# Altium footprint library Package_DFN_QFN.PcbLib: 735 footprints (part 17 of 46)
Each footprint in its own frame and in the unit in brackets; x right, y up, seen from the top. Pads: shape width x height; smd on the part's side, far side on the other; paste and mask are expansions set on the pad; w line width, h text height; cw(c..) or ccw(c..) is an arc to the next point about the centre after c.
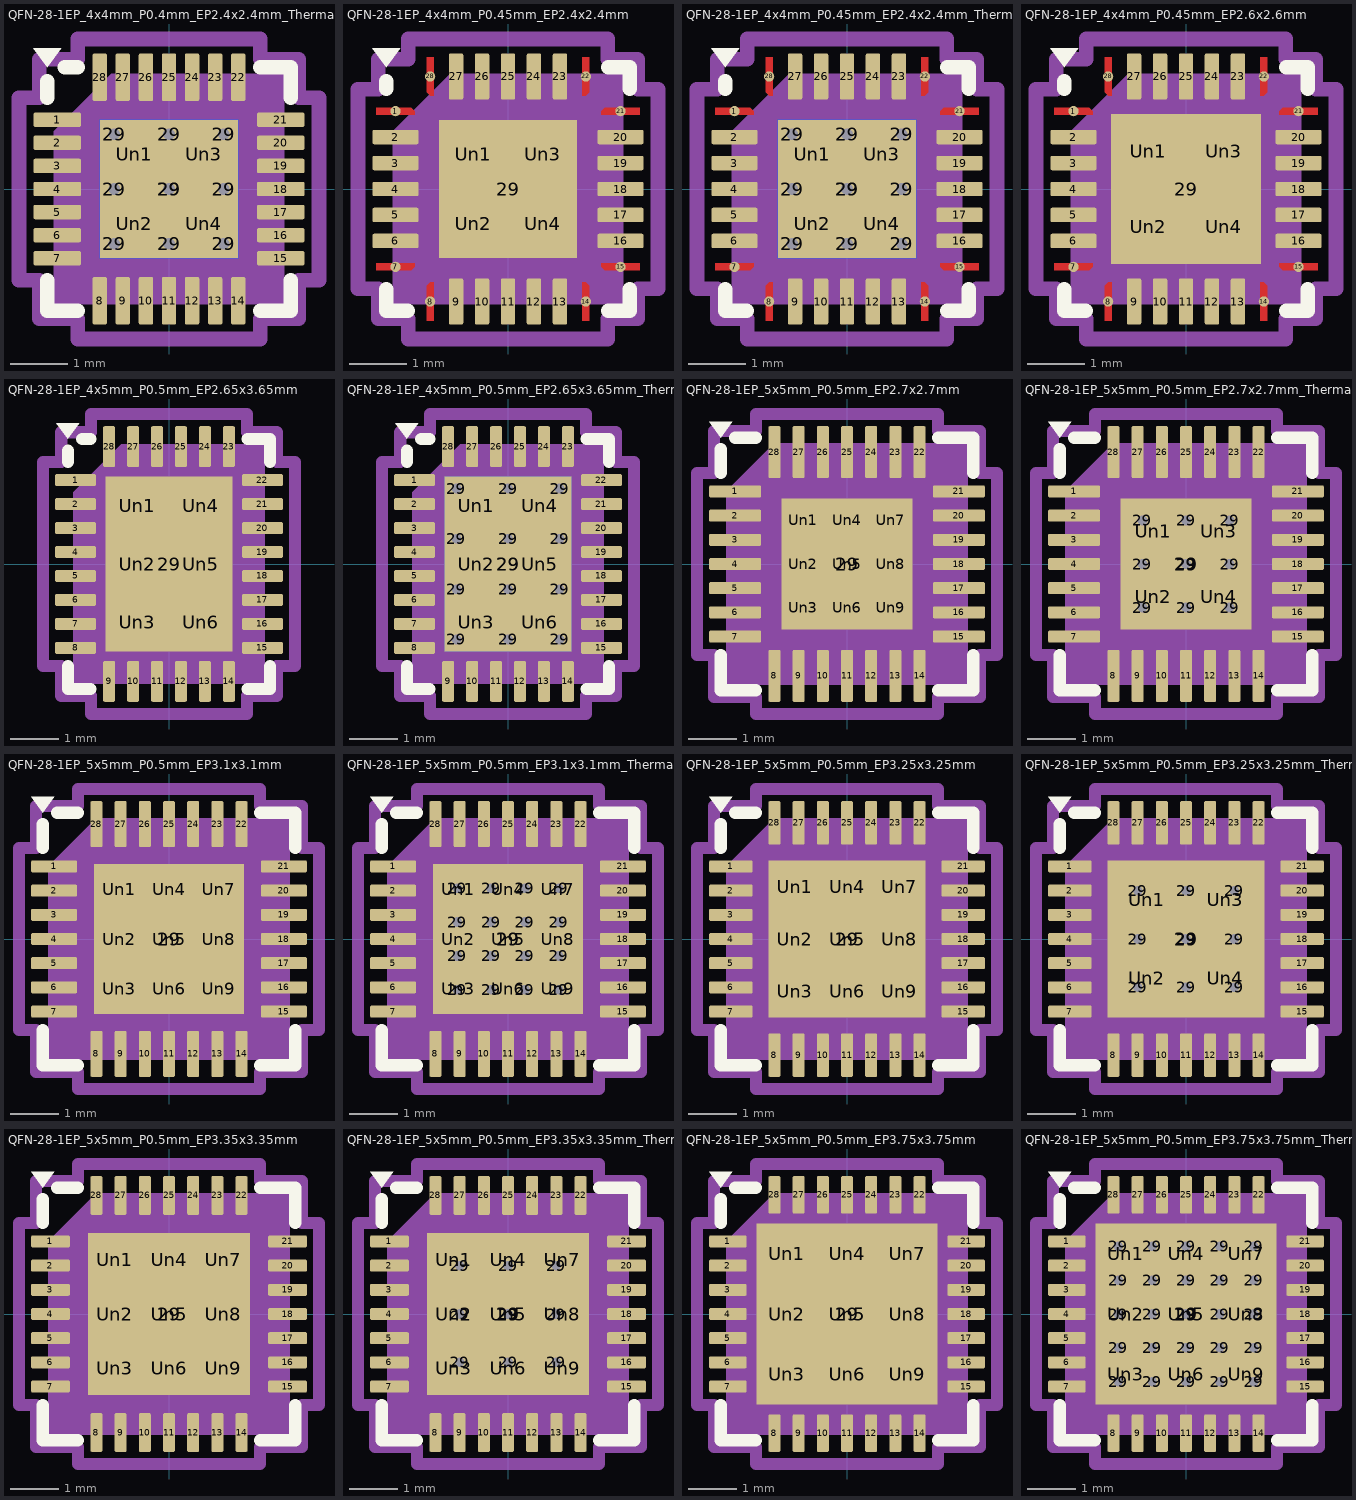
[diagram p16: the footprints below, top view; thin cyan lines are the x and y axes]

## QFN-28-1EP_4x4mm_P0.4mm_EP2.4x2.4mm_ThermalVias [mm] "QFN-28-1EP_4x4mm_P0.4mm_EP2.4x2.4mm_ThermalVias"
pads (43):
  rrect25% 0.825x0.25 smd: 1(-1.937,1.2) 2(-1.937,0.8) 3(-1.937,0.4) 4(-1.937,0) 5(-1.937,-0.4) 6(-1.937,-0.8) 7(-1.937,-1.2) 15(1.937,-1.2) 16(1.937,-0.8) 17(1.937,-0.4) 18(1.937,0) 19(1.937,0.4) 20(1.937,0.8) 21(1.937,1.2)
  rrect25% 0.25x0.825 smd: 8(-1.2,-1.937) 9(-0.8,-1.937) 10(-0.4,-1.937) 11(0,-1.937) 12(0.4,-1.937) 13(0.8,-1.937) 14(1.2,-1.937) 22(1.2,1.937) 23(0.8,1.937) 24(0.4,1.937) 25(0,1.937) 26(-0.4,1.937) 27(-0.8,1.937) 28(-1.2,1.937)
  round 0.5 hole 0.2: 29(-0.95,-0.95) 29(-0.95,0) 29(-0.95,0.95) 29(0,-0.95) 29(0,0) 29(0,0.95) 29(0.95,-0.95) 29(0.95,0) 29(0.95,0.95)
  rect 2.4x2.4 smd: 29(0,0)
  rect 2.4x2.4 smd far side: 29(0,0)
  rrect24% 1.04x1.04 on Top Paste: Un1(-0.6,0.6) Un2(-0.6,-0.6) Un3(0.6,0.6) Un4(0.6,-0.6)
F.SilkS:
  region: -2.11,2.11 -2.35,2.44 -1.87,2.44
  lines w0.254: -2.11,-1.585 -2.11,-2.11 -1.585,-2.11 ; -2.11,1.585 -2.11,1.87 ; -1.81,2.11 -1.585,2.11 ; 1.585,-2.11 2.11,-2.11 2.11,-1.585 ; 1.585,2.11 2.11,2.11 2.11,1.585
Top Component Center:
  lines w0.127: -0.127,0 0.127,0 -0.127,0 ; 0,-0.127 0,0.127 0,-0.127
Top Assembly:
  region: 2,-2 -2,-2 -2,1 -1,2 2,2
Top Courtyard:
  lines w0.254: -2.6,-1.58 -2.6,1.58 -2.25,1.58 -2.25,2.25 -1.58,2.25 -1.58,2.6 1.58,2.6 1.58,2.25 2.25,2.25 2.25,1.58 2.6,1.58 2.6,-1.58 2.25,-1.58 2.25,-2.25 1.58,-2.25 1.58,-2.6 -1.58,-2.6 -1.58,-2.25 -2.25,-2.25 -2.25,-1.58 -2.6,-1.58
Top Designator:
  text ".Designator" at -3.43,-0.344 h1.52
3D body "QFN-28-1EP_4x4mm_P0.4mm_EP2.4x2.4mm.step": height 0.77, standoff 0, extent -2,-2 2,2

## QFN-28-1EP_4x4mm_P0.45mm_EP2.4x2.4mm [mm] "QFN-28-1EP_4x4mm_P0.45mm_EP2.4x2.4mm"
pads (33):
  round 0.179 smd: 1(-1.95,1.35) 7(-1.95,-1.35) 8(-1.35,-1.95) 14(1.35,-1.95) 15(1.95,-1.35) 21(1.95,1.35) 22(1.35,1.95) 28(-1.35,1.95)
  rrect25% 0.8x0.25 smd: 2(-1.95,0.9) 3(-1.95,0.45) 4(-1.95,0) 5(-1.95,-0.45) 6(-1.95,-0.9) 16(1.95,-0.9) 17(1.95,-0.45) 18(1.95,0) 19(1.95,0.45) 20(1.95,0.9)
  rrect25% 0.25x0.8 smd: 9(-0.9,-1.95) 10(-0.45,-1.95) 11(0,-1.95) 12(0.45,-1.95) 13(0.9,-1.95) 23(0.9,1.95) 24(0.45,1.95) 25(0,1.95) 26(-0.45,1.95) 27(-0.9,1.95)
  rect 2.4x2.4 smd: 29(0,0)
  rrect25% 0.97x0.97 on Top Paste: Un1(-0.6,0.6) Un2(-0.6,-0.6) Un3(0.6,0.6) Un4(0.6,-0.6)
F.Cu:
  region: -1.613,1.349 -1.613,1.288 -2.288,1.288 -2.288,1.412 -1.676,1.412
  region: -1.613,-1.349 -1.676,-1.412 -2.288,-1.412 -2.288,-1.288 -1.613,-1.288
  region: -1.288,-2.288 -1.412,-2.288 -1.412,-1.676 -1.349,-1.613 -1.288,-1.613
  region: 1.412,-1.676 1.412,-2.288 1.288,-2.288 1.288,-1.613 1.349,-1.613
  region: 2.288,-1.412 1.676,-1.412 1.613,-1.349 1.613,-1.288 2.288,-1.288
  region: 2.288,1.288 1.613,1.288 1.613,1.349 1.676,1.412 2.288,1.412
  region: 1.412,1.676 1.349,1.613 1.288,1.613 1.288,2.288 1.412,2.288
  region: -1.288,1.613 -1.349,1.613 -1.412,1.676 -1.412,2.288 -1.288,2.288
F.SilkS:
  region: -2.11,2.11 -2.35,2.44 -1.87,2.44
  lines w0.254: -2.11,-1.735 -2.11,-2.11 -1.735,-2.11 ; -2.11,1.735 -2.11,1.87 ; 1.735,-2.11 2.11,-2.11 2.11,-1.735 ; 1.735,2.11 2.11,2.11 2.11,1.735
F.Paste:
  region: -1.613,1.349 -1.613,1.288 -2.288,1.288 -2.288,1.412 -1.676,1.412
  region: -1.613,-1.349 -1.676,-1.412 -2.288,-1.412 -2.288,-1.288 -1.613,-1.288
  region: -1.288,-2.288 -1.412,-2.288 -1.412,-1.676 -1.349,-1.613 -1.288,-1.613
  region: 1.412,-1.676 1.412,-2.288 1.288,-2.288 1.288,-1.613 1.349,-1.613
  region: 2.288,-1.412 1.676,-1.412 1.613,-1.349 1.613,-1.288 2.288,-1.288
  region: 2.288,1.288 1.613,1.288 1.613,1.349 1.676,1.412 2.288,1.412
  region: 1.412,1.676 1.349,1.613 1.288,1.613 1.288,2.288 1.412,2.288
  region: -1.288,1.613 -1.349,1.613 -1.412,1.676 -1.412,2.288 -1.288,2.288
F.Mask:
  region: -1.613,1.349 -1.613,1.288 -2.288,1.288 -2.288,1.412 -1.676,1.412
  region: -1.613,-1.349 -1.676,-1.412 -2.288,-1.412 -2.288,-1.288 -1.613,-1.288
  region: -1.288,-2.288 -1.412,-2.288 -1.412,-1.676 -1.349,-1.613 -1.288,-1.613
  region: 1.412,-1.676 1.412,-2.288 1.288,-2.288 1.288,-1.613 1.349,-1.613
  region: 2.288,-1.412 1.676,-1.412 1.613,-1.349 1.613,-1.288 2.288,-1.288
  region: 2.288,1.288 1.613,1.288 1.613,1.349 1.676,1.412 2.288,1.412
  region: 1.412,1.676 1.349,1.613 1.288,1.613 1.288,2.288 1.412,2.288
  region: -1.288,1.613 -1.349,1.613 -1.412,1.676 -1.412,2.288 -1.288,2.288
Top Component Center:
  lines w0.127: -0.127,0 0.127,0 -0.127,0 ; 0,-0.127 0,0.127 0,-0.127
Top Assembly:
  region: 2,-2 -2,-2 -2,1 -1,2 2,2
Top Courtyard:
  lines w0.254: -2.6,-1.73 -2.6,1.73 -2.25,1.73 -2.25,2.25 -1.73,2.25 -1.73,2.6 1.73,2.6 1.73,2.25 2.25,2.25 2.25,1.73 2.6,1.73 2.6,-1.73 2.25,-1.73 2.25,-2.25 1.73,-2.25 1.73,-2.6 -1.73,-2.6 -1.73,-2.25 -2.25,-2.25 -2.25,-1.73 -2.6,-1.73
Top Designator:
  text ".Designator" at -3.43,-0.344 h1.52

## QFN-28-1EP_4x4mm_P0.45mm_EP2.4x2.4mm_ThermalVias [mm] "QFN-28-1EP_4x4mm_P0.45mm_EP2.4x2.4mm_ThermalVias"
pads (43):
  round 0.179 smd: 1(-1.95,1.35) 7(-1.95,-1.35) 8(-1.35,-1.95) 14(1.35,-1.95) 15(1.95,-1.35) 21(1.95,1.35) 22(1.35,1.95) 28(-1.35,1.95)
  rrect25% 0.8x0.25 smd: 2(-1.95,0.9) 3(-1.95,0.45) 4(-1.95,0) 5(-1.95,-0.45) 6(-1.95,-0.9) 16(1.95,-0.9) 17(1.95,-0.45) 18(1.95,0) 19(1.95,0.45) 20(1.95,0.9)
  rrect25% 0.25x0.8 smd: 9(-0.9,-1.95) 10(-0.45,-1.95) 11(0,-1.95) 12(0.45,-1.95) 13(0.9,-1.95) 23(0.9,1.95) 24(0.45,1.95) 25(0,1.95) 26(-0.45,1.95) 27(-0.9,1.95)
  round 0.5 hole 0.2: 29(-0.95,-0.95) 29(-0.95,0) 29(-0.95,0.95) 29(0,-0.95) 29(0,0) 29(0,0.95) 29(0.95,-0.95) 29(0.95,0) 29(0.95,0.95)
  rect 2.4x2.4 smd: 29(0,0)
  rect 2.4x2.4 smd far side: 29(0,0)
  rrect24% 1.04x1.04 on Top Paste: Un1(-0.6,0.6) Un2(-0.6,-0.6) Un3(0.6,0.6) Un4(0.6,-0.6)
F.Cu:
  region: -1.613,1.349 -1.613,1.288 -2.288,1.288 -2.288,1.412 -1.676,1.412
  region: -1.613,-1.349 -1.676,-1.412 -2.288,-1.412 -2.288,-1.288 -1.613,-1.288
  region: -1.288,-2.288 -1.412,-2.288 -1.412,-1.676 -1.349,-1.613 -1.288,-1.613
  region: 1.412,-1.676 1.412,-2.288 1.288,-2.288 1.288,-1.613 1.349,-1.613
  region: 2.288,-1.412 1.676,-1.412 1.613,-1.349 1.613,-1.288 2.288,-1.288
  region: 2.288,1.288 1.613,1.288 1.613,1.349 1.676,1.412 2.288,1.412
  region: 1.412,1.676 1.349,1.613 1.288,1.613 1.288,2.288 1.412,2.288
  region: -1.288,1.613 -1.349,1.613 -1.412,1.676 -1.412,2.288 -1.288,2.288
F.SilkS:
  region: -2.11,2.11 -2.35,2.44 -1.87,2.44
  lines w0.254: -2.11,-1.735 -2.11,-2.11 -1.735,-2.11 ; -2.11,1.735 -2.11,1.87 ; 1.735,-2.11 2.11,-2.11 2.11,-1.735 ; 1.735,2.11 2.11,2.11 2.11,1.735
F.Paste:
  region: -1.613,1.349 -1.613,1.288 -2.288,1.288 -2.288,1.412 -1.676,1.412
  region: -1.613,-1.349 -1.676,-1.412 -2.288,-1.412 -2.288,-1.288 -1.613,-1.288
  region: -1.288,-2.288 -1.412,-2.288 -1.412,-1.676 -1.349,-1.613 -1.288,-1.613
  region: 1.412,-1.676 1.412,-2.288 1.288,-2.288 1.288,-1.613 1.349,-1.613
  region: 2.288,-1.412 1.676,-1.412 1.613,-1.349 1.613,-1.288 2.288,-1.288
  region: 2.288,1.288 1.613,1.288 1.613,1.349 1.676,1.412 2.288,1.412
  region: 1.412,1.676 1.349,1.613 1.288,1.613 1.288,2.288 1.412,2.288
  region: -1.288,1.613 -1.349,1.613 -1.412,1.676 -1.412,2.288 -1.288,2.288
F.Mask:
  region: -1.613,1.349 -1.613,1.288 -2.288,1.288 -2.288,1.412 -1.676,1.412
  region: -1.613,-1.349 -1.676,-1.412 -2.288,-1.412 -2.288,-1.288 -1.613,-1.288
  region: -1.288,-2.288 -1.412,-2.288 -1.412,-1.676 -1.349,-1.613 -1.288,-1.613
  region: 1.412,-1.676 1.412,-2.288 1.288,-2.288 1.288,-1.613 1.349,-1.613
  region: 2.288,-1.412 1.676,-1.412 1.613,-1.349 1.613,-1.288 2.288,-1.288
  region: 2.288,1.288 1.613,1.288 1.613,1.349 1.676,1.412 2.288,1.412
  region: 1.412,1.676 1.349,1.613 1.288,1.613 1.288,2.288 1.412,2.288
  region: -1.288,1.613 -1.349,1.613 -1.412,1.676 -1.412,2.288 -1.288,2.288
Top Component Center:
  lines w0.127: -0.127,0 0.127,0 -0.127,0 ; 0,-0.127 0,0.127 0,-0.127
Top Assembly:
  region: 2,-2 -2,-2 -2,1 -1,2 2,2
Top Courtyard:
  lines w0.254: -2.6,-1.73 -2.6,1.73 -2.25,1.73 -2.25,2.25 -1.73,2.25 -1.73,2.6 1.73,2.6 1.73,2.25 2.25,2.25 2.25,1.73 2.6,1.73 2.6,-1.73 2.25,-1.73 2.25,-2.25 1.73,-2.25 1.73,-2.6 -1.73,-2.6 -1.73,-2.25 -2.25,-2.25 -2.25,-1.73 -2.6,-1.73
Top Designator:
  text ".Designator" at -3.43,-0.344 h1.52

## QFN-28-1EP_4x4mm_P0.45mm_EP2.6x2.6mm [mm] "QFN-28-1EP_4x4mm_P0.45mm_EP2.6x2.6mm"
pads (33):
  round 0.179 smd: 1(-1.95,1.35) 7(-1.95,-1.35) 8(-1.35,-1.95) 14(1.35,-1.95) 15(1.95,-1.35) 21(1.95,1.35) 22(1.35,1.95) 28(-1.35,1.95)
  rrect25% 0.8x0.25 smd: 2(-1.95,0.9) 3(-1.95,0.45) 4(-1.95,0) 5(-1.95,-0.45) 6(-1.95,-0.9) 16(1.95,-0.9) 17(1.95,-0.45) 18(1.95,0) 19(1.95,0.45) 20(1.95,0.9)
  rrect25% 0.25x0.8 smd: 9(-0.9,-1.95) 10(-0.45,-1.95) 11(0,-1.95) 12(0.45,-1.95) 13(0.9,-1.95) 23(0.9,1.95) 24(0.45,1.95) 25(0,1.95) 26(-0.45,1.95) 27(-0.9,1.95)
  rect 2.6x2.6 smd: 29(0,0)
  rrect24% 1.05x1.05 on Top Paste: Un1(-0.65,0.65) Un2(-0.65,-0.65) Un3(0.65,0.65) Un4(0.65,-0.65)
F.Cu:
  region: -1.288,1.613 -1.349,1.613 -1.412,1.676 -1.412,2.288 -1.288,2.288
  region: 1.412,1.676 1.349,1.613 1.288,1.613 1.288,2.288 1.412,2.288
  region: 2.288,1.288 1.613,1.288 1.613,1.349 1.676,1.412 2.288,1.412
  region: 2.288,-1.412 1.676,-1.412 1.613,-1.349 1.613,-1.288 2.288,-1.288
  region: 1.412,-1.676 1.412,-2.288 1.288,-2.288 1.288,-1.613 1.349,-1.613
  region: -1.288,-2.288 -1.412,-2.288 -1.412,-1.676 -1.349,-1.613 -1.288,-1.613
  region: -1.613,-1.349 -1.676,-1.412 -2.288,-1.412 -2.288,-1.288 -1.613,-1.288
  region: -1.613,1.349 -1.613,1.288 -2.288,1.288 -2.288,1.412 -1.676,1.412
F.SilkS:
  region: -2.11,2.11 -2.35,2.44 -1.87,2.44
  lines w0.254: -2.11,-1.735 -2.11,-2.11 -1.735,-2.11 ; -2.11,1.735 -2.11,1.87 ; 1.735,-2.11 2.11,-2.11 2.11,-1.735 ; 1.735,2.11 2.11,2.11 2.11,1.735
F.Paste:
  region: -1.288,1.613 -1.349,1.613 -1.412,1.676 -1.412,2.288 -1.288,2.288
  region: 1.412,1.676 1.349,1.613 1.288,1.613 1.288,2.288 1.412,2.288
  region: 2.288,1.288 1.613,1.288 1.613,1.349 1.676,1.412 2.288,1.412
  region: 2.288,-1.412 1.676,-1.412 1.613,-1.349 1.613,-1.288 2.288,-1.288
  region: 1.412,-1.676 1.412,-2.288 1.288,-2.288 1.288,-1.613 1.349,-1.613
  region: -1.288,-2.288 -1.412,-2.288 -1.412,-1.676 -1.349,-1.613 -1.288,-1.613
  region: -1.613,-1.349 -1.676,-1.412 -2.288,-1.412 -2.288,-1.288 -1.613,-1.288
  region: -1.613,1.349 -1.613,1.288 -2.288,1.288 -2.288,1.412 -1.676,1.412
F.Mask:
  region: -1.288,1.613 -1.349,1.613 -1.412,1.676 -1.412,2.288 -1.288,2.288
  region: 1.412,1.676 1.349,1.613 1.288,1.613 1.288,2.288 1.412,2.288
  region: 2.288,1.288 1.613,1.288 1.613,1.349 1.676,1.412 2.288,1.412
  region: 2.288,-1.412 1.676,-1.412 1.613,-1.349 1.613,-1.288 2.288,-1.288
  region: 1.412,-1.676 1.412,-2.288 1.288,-2.288 1.288,-1.613 1.349,-1.613
  region: -1.288,-2.288 -1.412,-2.288 -1.412,-1.676 -1.349,-1.613 -1.288,-1.613
  region: -1.613,-1.349 -1.676,-1.412 -2.288,-1.412 -2.288,-1.288 -1.613,-1.288
  region: -1.613,1.349 -1.613,1.288 -2.288,1.288 -2.288,1.412 -1.676,1.412
Top Component Center:
  lines w0.127: -0.127,0 0.127,0 -0.127,0 ; 0,-0.127 0,0.127 0,-0.127
Top Assembly:
  region: 2,-2 -2,-2 -2,1 -1,2 2,2
Top Courtyard:
  lines w0.254: -2.6,-1.73 -2.25,-1.73 -2.25,-2.25 -1.73,-2.25 -1.73,-2.6 1.73,-2.6 1.73,-2.25 2.25,-2.25 2.25,-1.73 2.6,-1.73 2.6,1.73 2.25,1.73 2.25,2.25 1.73,2.25 1.73,2.6 -1.73,2.6 -1.73,2.25 -2.25,2.25 -2.25,1.73 -2.6,1.73 -2.6,-1.73
Top Designator:
  text ".Designator" at -3.43,-0.344 h1.52

## QFN-28-1EP_4x5mm_P0.5mm_EP2.65x3.65mm [mm] "QFN-28-1EP_4x5mm_P0.5mm_EP2.65x3.65mm"
pads (35):
  rrect25% 0.85x0.25 smd: 1(-1.95,1.75) 2(-1.95,1.25) 3(-1.95,0.75) 4(-1.95,0.25) 5(-1.95,-0.25) 6(-1.95,-0.75) 7(-1.95,-1.25) 8(-1.95,-1.75) 15(1.95,-1.75) 16(1.95,-1.25) 17(1.95,-0.75) 18(1.95,-0.25) 19(1.95,0.25) 20(1.95,0.75) 21(1.95,1.25) 22(1.95,1.75)
  rrect25% 0.25x0.85 smd: 9(-1.25,-2.45) 10(-0.75,-2.45) 11(-0.25,-2.45) 12(0.25,-2.45) 13(0.75,-2.45) 14(1.25,-2.45) 23(1.25,2.45) 24(0.75,2.45) 25(0.25,2.45) 26(-0.25,2.45) 27(-0.75,2.45) 28(-1.25,2.45)
  rect 2.65x3.65 smd: 29(0,0)
  rrect25% 1.07x0.98 on Top Paste: Un1(-0.66,1.22) Un2(-0.66,0) Un3(-0.66,-1.22) Un4(0.66,1.22) Un5(0.66,0) Un6(0.66,-1.22)
F.SilkS:
  region: -2.11,2.61 -2.35,2.94 -1.87,2.94
  lines w0.254: -2.11,-2.135 -2.11,-2.61 -1.635,-2.61 ; -2.11,2.135 -2.11,2.37 ; -1.81,2.61 -1.635,2.61 ; 1.635,-2.61 2.11,-2.61 2.11,-2.135 ; 1.635,2.61 2.11,2.61 2.11,2.135
Top Component Center:
  lines w0.127: -0.127,0 0.127,0 -0.127,0 ; 0,-0.127 0,0.127 0,-0.127
Top Assembly:
  region: 2,-2.5 -2,-2.5 -2,1.5 -1,2.5 2,2.5
Top Courtyard:
  lines w0.254: -2.63,-2.13 -2.63,2.13 -2.25,2.13 -2.25,2.75 -1.63,2.75 -1.63,3.13 1.63,3.13 1.63,2.75 2.25,2.75 2.25,2.13 2.63,2.13 2.63,-2.13 2.25,-2.13 2.25,-2.75 1.63,-2.75 1.63,-3.13 -1.63,-3.13 -1.63,-2.75 -2.25,-2.75 -2.25,-2.13 -2.63,-2.13
Top Designator:
  text ".Designator" at -3.43,-0.344 h1.52
3D body "QFN-28-1EP_4x5mm_P0.5mm_EP2.65x3.25mm.step": height 0.77, standoff 0, extent -2,-2.5 2,2.5

## QFN-28-1EP_4x5mm_P0.5mm_EP2.65x3.65mm_ThermalVias [mm] "QFN-28-1EP_4x5mm_P0.5mm_EP2.65x3.65mm_ThermalVias"
pads (48):
  rrect25% 0.85x0.25 smd: 1(-1.95,1.75) 2(-1.95,1.25) 3(-1.95,0.75) 4(-1.95,0.25) 5(-1.95,-0.25) 6(-1.95,-0.75) 7(-1.95,-1.25) 8(-1.95,-1.75) 15(1.95,-1.75) 16(1.95,-1.25) 17(1.95,-0.75) 18(1.95,-0.25) 19(1.95,0.25) 20(1.95,0.75) 21(1.95,1.25) 22(1.95,1.75)
  rrect25% 0.25x0.85 smd: 9(-1.25,-2.45) 10(-0.75,-2.45) 11(-0.25,-2.45) 12(0.25,-2.45) 13(0.75,-2.45) 14(1.25,-2.45) 23(1.25,2.45) 24(0.75,2.45) 25(0.25,2.45) 26(-0.25,2.45) 27(-0.75,2.45) 28(-1.25,2.45)
  round 0.5 hole 0.2: 29(-1.075,-1.575) 29(-1.075,-0.525) 29(-1.075,0.525) 29(-1.075,1.575) 29(0,-1.575) 29(0,-0.525) 29(0,0.525) 29(0,1.575) 29(1.075,-1.575) 29(1.075,-0.525) 29(1.075,0.525) 29(1.075,1.575)
  rect 2.65x3.65 smd: 29(0,0)
  rect 2.65x3.65 smd far side: 29(0,0)
  rrect25% 1.07x0.98 on Top Paste: Un1(-0.66,1.22) Un2(-0.66,0) Un3(-0.66,-1.22) Un4(0.66,1.22) Un5(0.66,0) Un6(0.66,-1.22)
F.SilkS:
  region: -2.11,2.61 -2.35,2.94 -1.87,2.94
  lines w0.254: -2.11,-2.135 -2.11,-2.61 -1.635,-2.61 ; -2.11,2.135 -2.11,2.37 ; -1.81,2.61 -1.635,2.61 ; 1.635,-2.61 2.11,-2.61 2.11,-2.135 ; 1.635,2.61 2.11,2.61 2.11,2.135
Top Component Center:
  lines w0.127: -0.127,0 0.127,0 -0.127,0 ; 0,-0.127 0,0.127 0,-0.127
Top Assembly:
  region: 2,-2.5 -2,-2.5 -2,1.5 -1,2.5 2,2.5
Top Courtyard:
  lines w0.254: -2.63,-2.13 -2.63,2.13 -2.25,2.13 -2.25,2.75 -1.63,2.75 -1.63,3.13 1.63,3.13 1.63,2.75 2.25,2.75 2.25,2.13 2.63,2.13 2.63,-2.13 2.25,-2.13 2.25,-2.75 1.63,-2.75 1.63,-3.13 -1.63,-3.13 -1.63,-2.75 -2.25,-2.75 -2.25,-2.13 -2.63,-2.13
Top Designator:
  text ".Designator" at -3.43,-0.344 h1.52
3D body "QFN-28-1EP_4x5mm_P0.5mm_EP2.65x3.25mm.step": height 0.77, standoff 0, extent -2,-2.5 2,2.5

## QFN-28-1EP_5x5mm_P0.5mm_EP2.7x2.7mm [mm] "QFN-28-1EP_5x5mm_P0.5mm_EP2.7x2.7mm"
pads (38):
  rrect25% 1.075x0.25 smd: 1(-2.312,1.5) 2(-2.312,1) 3(-2.312,0.5) 4(-2.312,0) 5(-2.312,-0.5) 6(-2.312,-1) 7(-2.312,-1.5) 15(2.312,-1.5) 16(2.312,-1) 17(2.312,-0.5) 18(2.312,0) 19(2.312,0.5) 20(2.312,1) 21(2.312,1.5)
  rrect25% 0.25x1.075 smd: 8(-1.5,-2.312) 9(-1,-2.312) 10(-0.5,-2.312) 11(0,-2.312) 12(0.5,-2.312) 13(1,-2.312) 14(1.5,-2.312) 22(1.5,2.312) 23(1,2.312) 24(0.5,2.312) 25(0,2.312) 26(-0.5,2.312) 27(-1,2.312) 28(-1.5,2.312)
  rect 2.7x2.7 smd: 29(0,0)
  rrect25% 0.73x0.73 on Top Paste: Un1(-0.9,0.9) Un2(-0.9,0) Un3(-0.9,-0.9) Un4(0,0.9) Un5(0,0) Un6(0,-0.9) Un7(0.9,0.9) Un8(0.9,0) Un9(0.9,-0.9)
F.SilkS:
  region: -2.61,2.61 -2.85,2.94 -2.37,2.94
  lines w0.254: -2.61,-1.885 -2.61,-2.61 -1.885,-2.61 ; -2.61,1.885 -2.61,2.37 ; -2.31,2.61 -1.885,2.61 ; 1.885,-2.61 2.61,-2.61 2.61,-1.885 ; 1.885,2.61 2.61,2.61 2.61,1.885
Top Component Center:
  lines w0.127: -0.127,0 0.127,0 -0.127,0 ; 0,-0.127 0,0.127 0,-0.127
Top Assembly:
  region: 2.5,-2.5 -2.5,-2.5 -2.5,1.5 -1.5,2.5 2.5,2.5
Top Courtyard:
  lines w0.254: -3.1,-1.88 -2.75,-1.88 -2.75,-2.75 -1.88,-2.75 -1.88,-3.1 1.88,-3.1 1.88,-2.75 2.75,-2.75 2.75,-1.88 3.1,-1.88 3.1,1.88 2.75,1.88 2.75,2.75 1.88,2.75 1.88,3.1 -1.88,3.1 -1.88,2.75 -2.75,2.75 -2.75,1.88 -3.1,1.88 -3.1,-1.88
Top Designator:
  text ".Designator" at -3.43,-0.344 h1.52
3D body "QFN-28-1EP_5x5mm_P0.5mm_EP3.35x3.35mm.step": height 0.92, standoff 0, extent -2.5,-2.5 2.5,2.5

## QFN-28-1EP_5x5mm_P0.5mm_EP2.7x2.7mm_ThermalVias [mm] "QFN-28-1EP_5x5mm_P0.5mm_EP2.7x2.7mm_ThermalVias"
pads (43):
  rrect25% 1.075x0.25 smd: 1(-2.312,1.5) 2(-2.312,1) 3(-2.312,0.5) 4(-2.312,0) 5(-2.312,-0.5) 6(-2.312,-1) 7(-2.312,-1.5) 15(2.312,-1.5) 16(2.312,-1) 17(2.312,-0.5) 18(2.312,0) 19(2.312,0.5) 20(2.312,1) 21(2.312,1.5)
  rrect25% 0.25x1.075 smd: 8(-1.5,-2.312) 9(-1,-2.312) 10(-0.5,-2.312) 11(0,-2.312) 12(0.5,-2.312) 13(1,-2.312) 14(1.5,-2.312) 22(1.5,2.312) 23(1,2.312) 24(0.5,2.312) 25(0,2.312) 26(-0.5,2.312) 27(-1,2.312) 28(-1.5,2.312)
  round 0.5 hole 0.2: 29(-0.9,-0.9) 29(-0.9,0) 29(-0.9,0.9) 29(0,-0.9) 29(0,0) 29(0,0.9) 29(0.9,-0.9) 29(0.9,0) 29(0.9,0.9)
  rect 2.7x2.7 smd: 29(0,0)
  rect 2.3x2.3 smd far side: 29(0,0)
  rrect23% 1.09x1.09 on Top Paste: Un1(-0.675,0.675) Un2(-0.675,-0.675) Un3(0.675,0.675) Un4(0.675,-0.675)
F.SilkS:
  region: -2.61,2.61 -2.85,2.94 -2.37,2.94
  lines w0.254: -2.61,-1.885 -2.61,-2.61 -1.885,-2.61 ; -2.61,1.885 -2.61,2.37 ; -2.31,2.61 -1.885,2.61 ; 1.885,-2.61 2.61,-2.61 2.61,-1.885 ; 1.885,2.61 2.61,2.61 2.61,1.885
Top Component Center:
  lines w0.127: -0.127,0 0.127,0 -0.127,0 ; 0,-0.127 0,0.127 0,-0.127
Top Assembly:
  region: 2.5,-2.5 -2.5,-2.5 -2.5,1.5 -1.5,2.5 2.5,2.5
Top Courtyard:
  lines w0.254: -3.1,-1.88 -2.75,-1.88 -2.75,-2.75 -1.88,-2.75 -1.88,-3.1 1.88,-3.1 1.88,-2.75 2.75,-2.75 2.75,-1.88 3.1,-1.88 3.1,1.88 2.75,1.88 2.75,2.75 1.88,2.75 1.88,3.1 -1.88,3.1 -1.88,2.75 -2.75,2.75 -2.75,1.88 -3.1,1.88 -3.1,-1.88
Top Designator:
  text ".Designator" at -3.43,-0.344 h1.52
3D body "QFN-28-1EP_5x5mm_P0.5mm_EP3.35x3.35mm.step": height 0.92, standoff 0, extent -2.5,-2.5 2.5,2.5

## QFN-28-1EP_5x5mm_P0.5mm_EP3.1x3.1mm [mm] "QFN-28-1EP_5x5mm_P0.5mm_EP3.1x3.1mm"
pads (38):
  rrect25% 0.95x0.25 smd: 1(-2.375,1.5) 2(-2.375,1) 3(-2.375,0.5) 4(-2.375,0) 5(-2.375,-0.5) 6(-2.375,-1) 7(-2.375,-1.5) 15(2.375,-1.5) 16(2.375,-1) 17(2.375,-0.5) 18(2.375,0) 19(2.375,0.5) 20(2.375,1) 21(2.375,1.5)
  rrect25% 0.25x0.95 smd: 8(-1.5,-2.375) 9(-1,-2.375) 10(-0.5,-2.375) 11(0,-2.375) 12(0.5,-2.375) 13(1,-2.375) 14(1.5,-2.375) 22(1.5,2.375) 23(1,2.375) 24(0.5,2.375) 25(0,2.375) 26(-0.5,2.375) 27(-1,2.375) 28(-1.5,2.375)
  rect 3.1x3.1 smd: 29(0,0)
  rrect25% 0.83x0.83 on Top Paste: Un1(-1.03,1.03) Un2(-1.03,0) Un3(-1.03,-1.03) Un4(0,1.03) Un5(0,0) Un6(0,-1.03) Un7(1.03,1.03) Un8(1.03,0) Un9(1.03,-1.03)
F.SilkS:
  region: -2.61,2.61 -2.85,2.94 -2.37,2.94
  lines w0.254: -2.61,-1.885 -2.61,-2.61 -1.885,-2.61 ; -2.61,1.885 -2.61,2.37 ; -2.31,2.61 -1.885,2.61 ; 1.885,-2.61 2.61,-2.61 2.61,-1.885 ; 1.885,2.61 2.61,2.61 2.61,1.885
Top Component Center:
  lines w0.127: -0.127,0 0.127,0 -0.127,0 ; 0,-0.127 0,0.127 0,-0.127
Top Assembly:
  region: 2.5,-2.5 -2.5,-2.5 -2.5,1.5 -1.5,2.5 2.5,2.5
Top Courtyard:
  lines w0.254: -3.1,-1.88 -3.1,1.88 -2.75,1.88 -2.75,2.75 -1.88,2.75 -1.88,3.1 1.88,3.1 1.88,2.75 2.75,2.75 2.75,1.88 3.1,1.88 3.1,-1.88 2.75,-1.88 2.75,-2.75 1.88,-2.75 1.88,-3.1 -1.88,-3.1 -1.88,-2.75 -2.75,-2.75 -2.75,-1.88 -3.1,-1.88
Top Designator:
  text ".Designator" at -3.43,-0.344 h1.52
3D body "QFN-28-1EP_5x5mm_P0.5mm_EP3.35x3.35mm.step": height 0.92, standoff 0, extent -2.5,-2.5 2.5,2.5

## QFN-28-1EP_5x5mm_P0.5mm_EP3.1x3.1mm_ThermalVias [mm] "QFN-28-1EP_5x5mm_P0.5mm_EP3.1x3.1mm_ThermalVias"
pads (55):
  rrect25% 0.95x0.25 smd: 1(-2.375,1.5) 2(-2.375,1) 3(-2.375,0.5) 4(-2.375,0) 5(-2.375,-0.5) 6(-2.375,-1) 7(-2.375,-1.5) 15(2.375,-1.5) 16(2.375,-1) 17(2.375,-0.5) 18(2.375,0) 19(2.375,0.5) 20(2.375,1) 21(2.375,1.5)
  rrect25% 0.25x0.95 smd: 8(-1.5,-2.375) 9(-1,-2.375) 10(-0.5,-2.375) 11(0,-2.375) 12(0.5,-2.375) 13(1,-2.375) 14(1.5,-2.375) 22(1.5,2.375) 23(1,2.375) 24(0.5,2.375) 25(0,2.375) 26(-0.5,2.375) 27(-1,2.375) 28(-1.5,2.375)
  round 0.5 hole 0.2: 29(-1.05,-1.05) 29(-1.05,-0.35) 29(-1.05,0.35) 29(-1.05,1.05) 29(-0.35,-1.05) 29(-0.35,-0.35) 29(-0.35,0.35) 29(-0.35,1.05) 29(0.35,-1.05) 29(0.35,-0.35) 29(0.35,0.35) 29(0.35,1.05) 29(1.05,-1.05) 29(1.05,-0.35) 29(1.05,0.35) 29(1.05,1.05)
  rect 3.1x3.1 smd: 29(0,0)
  rect 2.6x2.6 smd far side: 29(0,0)
  rrect25% 0.83x0.83 on Top Paste: Un1(-1.03,1.03) Un2(-1.03,0) Un3(-1.03,-1.03) Un4(0,1.03) Un5(0,0) Un6(0,-1.03) Un7(1.03,1.03) Un8(1.03,0) Un9(1.03,-1.03)
F.SilkS:
  region: -2.61,2.61 -2.85,2.94 -2.37,2.94
  lines w0.254: -2.61,-1.885 -2.61,-2.61 -1.885,-2.61 ; -2.61,1.885 -2.61,2.37 ; -2.31,2.61 -1.885,2.61 ; 1.885,-2.61 2.61,-2.61 2.61,-1.885 ; 1.885,2.61 2.61,2.61 2.61,1.885
Top Component Center:
  lines w0.127: -0.127,0 0.127,0 -0.127,0 ; 0,-0.127 0,0.127 0,-0.127
Top Assembly:
  region: 2.5,-2.5 -2.5,-2.5 -2.5,1.5 -1.5,2.5 2.5,2.5
Top Courtyard:
  lines w0.254: -3.1,-1.88 -3.1,1.88 -2.75,1.88 -2.75,2.75 -1.88,2.75 -1.88,3.1 1.88,3.1 1.88,2.75 2.75,2.75 2.75,1.88 3.1,1.88 3.1,-1.88 2.75,-1.88 2.75,-2.75 1.88,-2.75 1.88,-3.1 -1.88,-3.1 -1.88,-2.75 -2.75,-2.75 -2.75,-1.88 -3.1,-1.88
Top Designator:
  text ".Designator" at -3.43,-0.344 h1.52
3D body "QFN-28-1EP_5x5mm_P0.5mm_EP3.35x3.35mm.step": height 0.92, standoff 0, extent -2.5,-2.5 2.5,2.5

## QFN-28-1EP_5x5mm_P0.5mm_EP3.25x3.25mm [mm] "QFN-28-1EP_5x5mm_P0.5mm_EP3.25x3.25mm"
pads (38):
  rrect25% 0.9x0.25 smd: 1(-2.4,1.5) 2(-2.4,1) 3(-2.4,0.5) 4(-2.4,0) 5(-2.4,-0.5) 6(-2.4,-1) 7(-2.4,-1.5) 15(2.4,-1.5) 16(2.4,-1) 17(2.4,-0.5) 18(2.4,0) 19(2.4,0.5) 20(2.4,1) 21(2.4,1.5)
  rrect25% 0.25x0.9 smd: 8(-1.5,-2.4) 9(-1,-2.4) 10(-0.5,-2.4) 11(0,-2.4) 12(0.5,-2.4) 13(1,-2.4) 14(1.5,-2.4) 22(1.5,2.4) 23(1,2.4) 24(0.5,2.4) 25(0,2.4) 26(-0.5,2.4) 27(-1,2.4) 28(-1.5,2.4)
  rect 3.25x3.25 smd: 29(0,0)
  rrect25% 0.89x0.89 on Top Paste: Un1(-1.08,1.08) Un2(-1.08,0) Un3(-1.08,-1.08) Un4(0,1.08) Un5(0,0) Un6(0,-1.08) Un7(1.08,1.08) Un8(1.08,0) Un9(1.08,-1.08)
F.SilkS:
  region: -2.61,2.61 -2.85,2.94 -2.37,2.94
  lines w0.254: -2.61,-1.885 -2.61,-2.61 -1.885,-2.61 ; -2.61,1.885 -2.61,2.37 ; -2.31,2.61 -1.885,2.61 ; 1.885,-2.61 2.61,-2.61 2.61,-1.885 ; 1.885,2.61 2.61,2.61 2.61,1.885
Top Component Center:
  lines w0.127: -0.127,0 0.127,0 -0.127,0 ; 0,-0.127 0,0.127 0,-0.127
Top Assembly:
  region: 2.5,-2.5 -2.5,-2.5 -2.5,1.5 -1.5,2.5 2.5,2.5
Top Courtyard:
  lines w0.254: -3.1,-1.88 -2.75,-1.88 -2.75,-2.75 -1.88,-2.75 -1.88,-3.1 1.88,-3.1 1.88,-2.75 2.75,-2.75 2.75,-1.88 3.1,-1.88 3.1,1.88 2.75,1.88 2.75,2.75 1.88,2.75 1.88,3.1 -1.88,3.1 -1.88,2.75 -2.75,2.75 -2.75,1.88 -3.1,1.88 -3.1,-1.88
Top Designator:
  text ".Designator" at -3.43,-0.344 h1.52
3D body "QFN-28-1EP_5x5mm_P0.5mm_EP3.35x3.35mm.step": height 0.92, standoff 0, extent -2.5,-2.5 2.5,2.5

## QFN-28-1EP_5x5mm_P0.5mm_EP3.25x3.25mm_ThermalVias [mm] "QFN-28-1EP_5x5mm_P0.5mm_EP3.25x3.25mm_ThermalVias"
pads (43):
  rrect25% 0.9x0.25 smd: 1(-2.4,1.5) 2(-2.4,1) 3(-2.4,0.5) 4(-2.4,0) 5(-2.4,-0.5) 6(-2.4,-1) 7(-2.4,-1.5) 15(2.4,-1.5) 16(2.4,-1) 17(2.4,-0.5) 18(2.4,0) 19(2.4,0.5) 20(2.4,1) 21(2.4,1.5)
  rrect25% 0.25x0.9 smd: 8(-1.5,-2.4) 9(-1,-2.4) 10(-0.5,-2.4) 11(0,-2.4) 12(0.5,-2.4) 13(1,-2.4) 14(1.5,-2.4) 22(1.5,2.4) 23(1,2.4) 24(0.5,2.4) 25(0,2.4) 26(-0.5,2.4) 27(-1,2.4) 28(-1.5,2.4)
  round 0.5 hole 0.2: 29(-1,-1) 29(-1,0) 29(-1,1) 29(0,-1) 29(0,0) 29(0,1) 29(1,-1) 29(1,0) 29(1,1)
  rect 3.25x3.25 smd: 29(0,0)
  rect 2.5x2.5 smd far side: 29(0,0)
  rrect19% 1.33x1.33 on Top Paste: Un1(-0.81,0.81) Un2(-0.81,-0.81) Un3(0.81,0.81) Un4(0.81,-0.81)
F.SilkS:
  region: -2.61,2.61 -2.85,2.94 -2.37,2.94
  lines w0.254: -2.61,-1.885 -2.61,-2.61 -1.885,-2.61 ; -2.61,1.885 -2.61,2.37 ; -2.31,2.61 -1.885,2.61 ; 1.885,-2.61 2.61,-2.61 2.61,-1.885 ; 1.885,2.61 2.61,2.61 2.61,1.885
Top Component Center:
  lines w0.127: -0.127,0 0.127,0 -0.127,0 ; 0,-0.127 0,0.127 0,-0.127
Top Assembly:
  region: 2.5,-2.5 -2.5,-2.5 -2.5,1.5 -1.5,2.5 2.5,2.5
Top Courtyard:
  lines w0.254: -3.1,-1.88 -2.75,-1.88 -2.75,-2.75 -1.88,-2.75 -1.88,-3.1 1.88,-3.1 1.88,-2.75 2.75,-2.75 2.75,-1.88 3.1,-1.88 3.1,1.88 2.75,1.88 2.75,2.75 1.88,2.75 1.88,3.1 -1.88,3.1 -1.88,2.75 -2.75,2.75 -2.75,1.88 -3.1,1.88 -3.1,-1.88
Top Designator:
  text ".Designator" at -3.43,-0.344 h1.52
3D body "QFN-28-1EP_5x5mm_P0.5mm_EP3.35x3.35mm.step": height 0.92, standoff 0, extent -2.5,-2.5 2.5,2.5

## QFN-28-1EP_5x5mm_P0.5mm_EP3.35x3.35mm [mm] "QFN-28-1EP_5x5mm_P0.5mm_EP3.35x3.35mm"
pads (38):
  rrect25% 0.8x0.25 smd: 1(-2.45,1.5) 2(-2.45,1) 3(-2.45,0.5) 4(-2.45,0) 5(-2.45,-0.5) 6(-2.45,-1) 7(-2.45,-1.5) 15(2.45,-1.5) 16(2.45,-1) 17(2.45,-0.5) 18(2.45,0) 19(2.45,0.5) 20(2.45,1) 21(2.45,1.5)
  rrect25% 0.25x0.8 smd: 8(-1.5,-2.45) 9(-1,-2.45) 10(-0.5,-2.45) 11(0,-2.45) 12(0.5,-2.45) 13(1,-2.45) 14(1.5,-2.45) 22(1.5,2.45) 23(1,2.45) 24(0.5,2.45) 25(0,2.45) 26(-0.5,2.45) 27(-1,2.45) 28(-1.5,2.45)
  rect 3.35x3.35 smd: 29(0,0)
  rrect25% 0.9x0.9 on Top Paste: Un1(-1.12,1.12) Un2(-1.12,0) Un3(-1.12,-1.12) Un4(0,1.12) Un5(0,0) Un6(0,-1.12) Un7(1.12,1.12) Un8(1.12,0) Un9(1.12,-1.12)
F.SilkS:
  region: -2.61,2.61 -2.85,2.94 -2.37,2.94
  lines w0.254: -2.61,-1.885 -2.61,-2.61 -1.885,-2.61 ; -2.61,1.885 -2.61,2.37 ; -2.31,2.61 -1.885,2.61 ; 1.885,-2.61 2.61,-2.61 2.61,-1.885 ; 1.885,2.61 2.61,2.61 2.61,1.885
Top Component Center:
  lines w0.127: -0.127,0 0.127,0 -0.127,0 ; 0,-0.127 0,0.127 0,-0.127
Top Assembly:
  region: 2.5,-2.5 -2.5,-2.5 -2.5,1.5 -1.5,2.5 2.5,2.5
Top Courtyard:
  lines w0.254: -3.1,-1.88 -2.75,-1.88 -2.75,-2.75 -1.88,-2.75 -1.88,-3.1 1.88,-3.1 1.88,-2.75 2.75,-2.75 2.75,-1.88 3.1,-1.88 3.1,1.88 2.75,1.88 2.75,2.75 1.88,2.75 1.88,3.1 -1.88,3.1 -1.88,2.75 -2.75,2.75 -2.75,1.88 -3.1,1.88 -3.1,-1.88
Top Designator:
  text ".Designator" at -3.43,-0.344 h1.52
3D body "QFN-28-1EP_5x5mm_P0.5mm_EP3.35x3.35mm.step": height 0.92, standoff 0, extent -2.5,-2.5 2.5,2.5

## QFN-28-1EP_5x5mm_P0.5mm_EP3.35x3.35mm_ThermalVias [mm] "QFN-28-1EP_5x5mm_P0.5mm_EP3.35x3.35mm_ThermalVias"
pads (48):
  rrect25% 0.8x0.25 smd: 1(-2.45,1.5) 2(-2.45,1) 3(-2.45,0.5) 4(-2.45,0) 5(-2.45,-0.5) 6(-2.45,-1) 7(-2.45,-1.5) 15(2.45,-1.5) 16(2.45,-1) 17(2.45,-0.5) 18(2.45,0) 19(2.45,0.5) 20(2.45,1) 21(2.45,1.5)
  rrect25% 0.25x0.8 smd: 8(-1.5,-2.45) 9(-1,-2.45) 10(-0.5,-2.45) 11(0,-2.45) 12(0.5,-2.45) 13(1,-2.45) 14(1.5,-2.45) 22(1.5,2.45) 23(1,2.45) 24(0.5,2.45) 25(0,2.45) 26(-0.5,2.45) 27(-1,2.45) 28(-1.5,2.45)
  round 0.5 hole 0.2: 29(-1,-1) 29(-1,0) 29(-1,1) 29(0,-1) 29(0,0) 29(0,1) 29(1,-1) 29(1,0) 29(1,1)
  rect 3.35x3.35 smd: 29(0,0)
  rect 2.5x2.5 smd far side: 29(0,0)
  rrect25% 0.9x0.9 on Top Paste: Un1(-1.12,1.12) Un2(-1.12,0) Un3(-1.12,-1.12) Un4(0,1.12) Un5(0,0) Un6(0,-1.12) Un7(1.12,1.12) Un8(1.12,0) Un9(1.12,-1.12)
F.SilkS:
  region: -2.61,2.61 -2.85,2.94 -2.37,2.94
  lines w0.254: -2.61,-1.885 -2.61,-2.61 -1.885,-2.61 ; -2.61,1.885 -2.61,2.37 ; -2.31,2.61 -1.885,2.61 ; 1.885,-2.61 2.61,-2.61 2.61,-1.885 ; 1.885,2.61 2.61,2.61 2.61,1.885
Top Component Center:
  lines w0.127: -0.127,0 0.127,0 -0.127,0 ; 0,-0.127 0,0.127 0,-0.127
Top Assembly:
  region: 2.5,-2.5 -2.5,-2.5 -2.5,1.5 -1.5,2.5 2.5,2.5
Top Courtyard:
  lines w0.254: -3.1,-1.88 -2.75,-1.88 -2.75,-2.75 -1.88,-2.75 -1.88,-3.1 1.88,-3.1 1.88,-2.75 2.75,-2.75 2.75,-1.88 3.1,-1.88 3.1,1.88 2.75,1.88 2.75,2.75 1.88,2.75 1.88,3.1 -1.88,3.1 -1.88,2.75 -2.75,2.75 -2.75,1.88 -3.1,1.88 -3.1,-1.88
Top Designator:
  text ".Designator" at -3.43,-0.344 h1.52
3D body "QFN-28-1EP_5x5mm_P0.5mm_EP3.35x3.35mm.step": height 0.92, standoff 0, extent -2.5,-2.5 2.5,2.5

## QFN-28-1EP_5x5mm_P0.5mm_EP3.75x3.75mm [mm] "QFN-28-1EP_5x5mm_P0.5mm_EP3.75x3.75mm"
pads (38):
  rrect25% 0.775x0.25 smd: 1(-2.462,1.5) 2(-2.462,1) 3(-2.462,0.5) 4(-2.462,0) 5(-2.462,-0.5) 6(-2.462,-1) 7(-2.462,-1.5) 15(2.462,-1.5) 16(2.462,-1) 17(2.462,-0.5) 18(2.462,0) 19(2.462,0.5) 20(2.462,1) 21(2.462,1.5)
  rrect25% 0.25x0.775 smd: 8(-1.5,-2.462) 9(-1,-2.462) 10(-0.5,-2.462) 11(0,-2.462) 12(0.5,-2.462) 13(1,-2.462) 14(1.5,-2.462) 22(1.5,2.462) 23(1,2.462) 24(0.5,2.462) 25(0,2.462) 26(-0.5,2.462) 27(-1,2.462) 28(-1.5,2.462)
  rect 3.75x3.75 smd: 29(0,0)
  rrect25% 1.01x1.01 on Top Paste: Un1(-1.25,1.25) Un2(-1.25,0) Un3(-1.25,-1.25) Un4(0,1.25) Un5(0,0) Un6(0,-1.25) Un7(1.25,1.25) Un8(1.25,0) Un9(1.25,-1.25)
F.SilkS:
  region: -2.61,2.61 -2.85,2.94 -2.37,2.94
  lines w0.254: -2.61,-1.885 -2.61,-2.61 -1.885,-2.61 ; -2.61,1.885 -2.61,2.37 ; -2.31,2.61 -1.885,2.61 ; 1.885,-2.61 2.61,-2.61 2.61,-1.885 ; 1.885,2.61 2.61,2.61 2.61,1.885
Top Component Center:
  lines w0.127: -0.127,0 0.127,0 -0.127,0 ; 0,-0.127 0,0.127 0,-0.127
Top Assembly:
  region: 2.5,-2.5 -2.5,-2.5 -2.5,1.5 -1.5,2.5 2.5,2.5
Top Courtyard:
  lines w0.254: -3.1,-1.88 -2.75,-1.88 -2.75,-2.75 -1.88,-2.75 -1.88,-3.1 1.88,-3.1 1.88,-2.75 2.75,-2.75 2.75,-1.88 3.1,-1.88 3.1,1.88 2.75,1.88 2.75,2.75 1.88,2.75 1.88,3.1 -1.88,3.1 -1.88,2.75 -2.75,2.75 -2.75,1.88 -3.1,1.88 -3.1,-1.88
Top Designator:
  text ".Designator" at -3.43,-0.344 h1.52
3D body "QFN-28-1EP_5x5mm_P0.5mm_EP3.35x3.35mm.step": height 0.92, standoff 0, extent -2.5,-2.5 2.5,2.5

## QFN-28-1EP_5x5mm_P0.5mm_EP3.75x3.75mm_ThermalVias [mm] "QFN-28-1EP_5x5mm_P0.5mm_EP3.75x3.75mm_ThermalVias"
pads (64):
  rrect25% 0.775x0.25 smd: 1(-2.462,1.5) 2(-2.462,1) 3(-2.462,0.5) 4(-2.462,0) 5(-2.462,-0.5) 6(-2.462,-1) 7(-2.462,-1.5) 15(2.462,-1.5) 16(2.462,-1) 17(2.462,-0.5) 18(2.462,0) 19(2.462,0.5) 20(2.462,1) 21(2.462,1.5)
  rrect25% 0.25x0.775 smd: 8(-1.5,-2.462) 9(-1,-2.462) 10(-0.5,-2.462) 11(0,-2.462) 12(0.5,-2.462) 13(1,-2.462) 14(1.5,-2.462) 22(1.5,2.462) 23(1,2.462) 24(0.5,2.462) 25(0,2.462) 26(-0.5,2.462) 27(-1,2.462) 28(-1.5,2.462)
  round 0.5 hole 0.2: 29(-1.4,-1.4) 29(-1.4,-0.7) 29(-1.4,0) 29(-1.4,0.7) 29(-1.4,1.4) 29(-0.7,-1.4) 29(-0.7,-0.7) 29(-0.7,0) 29(-0.7,0.7) 29(-0.7,1.4) 29(0,-1.4) 29(0,-0.7) 29(0,0) 29(0,0.7) 29(0,1.4) 29(0.7,-1.4) 29(0.7,-0.7) 29(0.7,0) 29(0.7,0.7) 29(0.7,1.4) 29(1.4,-1.4) 29(1.4,-0.7) 29(1.4,0) 29(1.4,0.7) 29(1.4,1.4)
  rect 3.75x3.75 smd: 29(0,0)
  rect 3.3x3.3 smd far side: 29(0,0)
  rrect25% 1.01x1.01 on Top Paste: Un1(-1.25,1.25) Un2(-1.25,0) Un3(-1.25,-1.25) Un4(0,1.25) Un5(0,0) Un6(0,-1.25) Un7(1.25,1.25) Un8(1.25,0) Un9(1.25,-1.25)
F.SilkS:
  region: -2.61,2.61 -2.85,2.94 -2.37,2.94
  lines w0.254: -2.61,-1.885 -2.61,-2.61 -1.885,-2.61 ; -2.61,1.885 -2.61,2.37 ; -2.31,2.61 -1.885,2.61 ; 1.885,-2.61 2.61,-2.61 2.61,-1.885 ; 1.885,2.61 2.61,2.61 2.61,1.885
Top Component Center:
  lines w0.127: -0.127,0 0.127,0 -0.127,0 ; 0,-0.127 0,0.127 0,-0.127
Top Assembly:
  region: 2.5,-2.5 -2.5,-2.5 -2.5,1.5 -1.5,2.5 2.5,2.5
Top Courtyard:
  lines w0.254: -3.1,-1.88 -2.75,-1.88 -2.75,-2.75 -1.88,-2.75 -1.88,-3.1 1.88,-3.1 1.88,-2.75 2.75,-2.75 2.75,-1.88 3.1,-1.88 3.1,1.88 2.75,1.88 2.75,2.75 1.88,2.75 1.88,3.1 -1.88,3.1 -1.88,2.75 -2.75,2.75 -2.75,1.88 -3.1,1.88 -3.1,-1.88
Top Designator:
  text ".Designator" at -3.43,-0.344 h1.52
3D body "QFN-28-1EP_5x5mm_P0.5mm_EP3.35x3.35mm.step": height 0.92, standoff 0, extent -2.5,-2.5 2.5,2.5